# Altium footprint library zbook-rf-shields-BLE-P1.PcbLib: 34 footprints (part 2 of 3)
Each footprint in its own frame and in the unit in brackets; x right, y up, seen from the top. Pads: shape width x height; smd on the part's side, far side on the other; paste and mask are expansions set on the pad; w line width, h text height; cw(c..) or ccw(c..) is an arc to the next point about the centre after c.
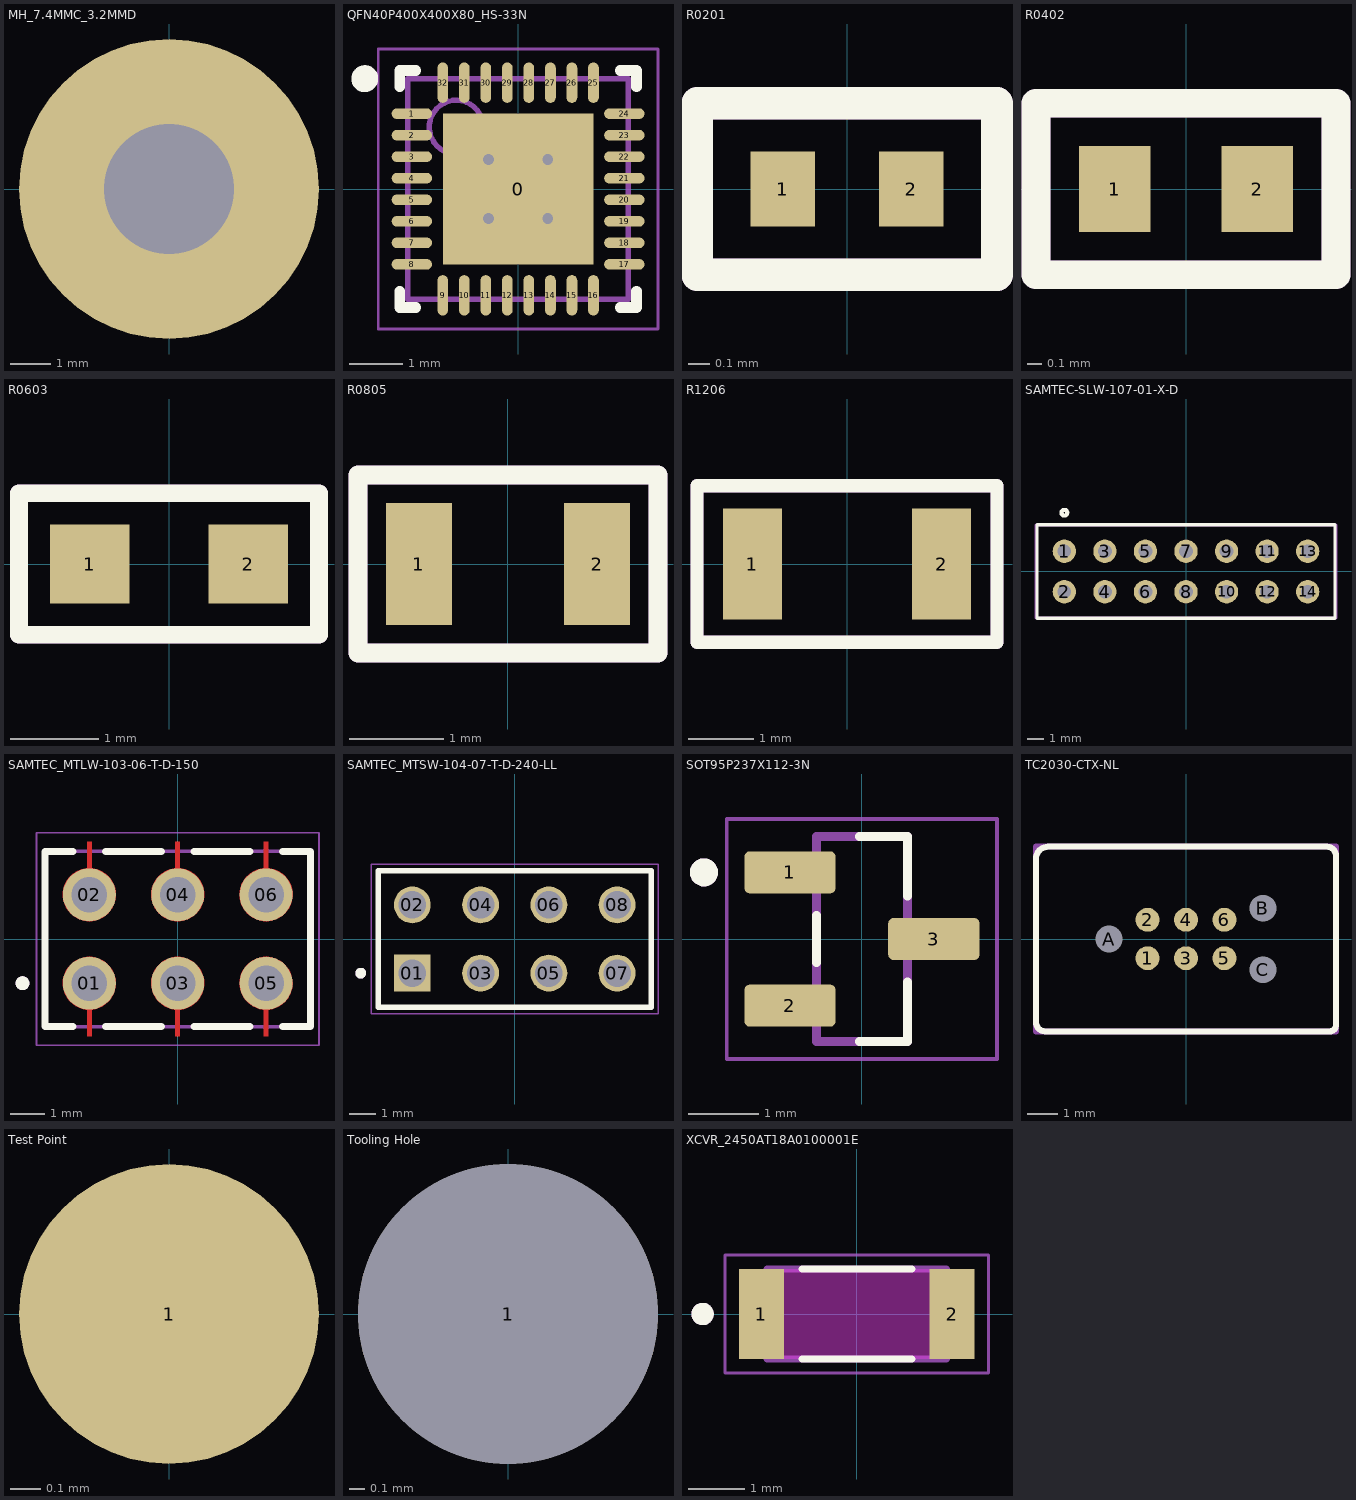
[diagram p1: the footprints below, top view; thin cyan lines are the x and y axes]

## MH_7.4MMC_3.2MMD [mm]
pads (1):
  round 7.4 hole 3.2: ""(0,0)

## PCBComponent_1 [mm]

## QFN40P400X400X80_HS-33N [mm] "QFN, 32-Leads, Body 4,00x4,00mm, Pitch 0,40mm, Thermal Pad 2,80x2,80mm, IPC Medium Density"
height 0.8
pads (33):
  rect 2.8x2.8 smd: 0(0,0)
  oval 0.75x0.2 smd: 1(-1.975,1.4) 2(-1.975,1) 3(-1.975,0.6) 4(-1.975,0.2) 5(-1.975,-0.2) 6(-1.975,-0.6) 7(-1.975,-1) 8(-1.975,-1.4) 17(1.975,-1.4) 18(1.975,-1) 19(1.975,-0.6) 20(1.975,-0.2) 21(1.975,0.2) 22(1.975,0.6) 23(1.975,1) 24(1.975,1.4)
  oval 0.2x0.75 smd: 9(-1.4,-1.975) 10(-1,-1.975) 11(-0.6,-1.975) 12(-0.2,-1.975) 13(0.2,-1.975) 14(0.6,-1.975) 15(1,-1.975) 16(1.4,-1.975) 25(1.4,1.975) 26(1,1.975) 27(0.6,1.975) 28(0.2,1.975) 29(-0.2,1.975) 30(-0.6,1.975) 31(-1,1.975) 32(-1.4,1.975)
via 0.55,-0.55 diameter 0.5 hole 0.2
via -0.55,-0.55 diameter 0.5 hole 0.2
via 0.55,0.55 diameter 0.5 hole 0.2
via -0.55,0.55 diameter 0.5 hole 0.2
Top Overlay:
  circle w0.25: c-2.85,2.05 r0.125
  lines w0.2: -2.2,-1.9 -2.2,-2.2 -1.9,-2.2 ; -2.2,1.9 -2.2,2.2 -1.9,2.2 ; 1.9,-2.2 2.2,-2.2 2.2,-1.9 ; 1.9,2.2 2.2,2.2 2.2,1.9
Top Courtyard:
  lines w0.05: -2.6,-2.6 2.6,-2.6 2.6,2.6 -2.6,2.6 -2.6,-2.6
  lines w0.1: -0.5,0 0.5,0 ; 0,-0.5 0,0.5
Top Assembly:
  circle w0.1: c-1.15,1.15 r0.5
  lines w0.1: -2.05,-2.05 2.05,-2.05 2.05,2.05 -2.05,2.05 -2.05,-2.05
3D body: height 0.25, standoff 0, extent -2.54,-2.54 2.54,2.54

## R0201 [mm]
pads (2):
  rect 0.3x0.35 smd mask+0.06: 1(-0.3,0) 2(0.3,0)
Top Overlay:
  lines w0.15: -0.7,-0.4 0.7,-0.4 0.7,0.4 -0.7,0.4 -0.7,-0.4
Mechanical 29:
  lines w0.15: -0.7,-0.4 -0.7,0.4 0.7,0.4 0.7,-0.4 -0.7,-0.4
  text "'.Designator'" at -0.4,-0.1 h0.2
3D body "C0201.step": height 0.3, standoff 0, extent -0.3,-0.15 0.3,0.15

## R0402 [mm]
pads (2):
  rect 0.5x0.6 smd: 1(-0.5,0) 2(0.5,0)
Top Overlay:
  lines w0.2: -1.05,-0.6 1.05,-0.6 1.05,0.6 -1.05,0.6 -1.05,-0.6
Mechanical 29:
  lines w0.2: -1.05,-0.6 1.05,-0.6 1.05,0.6 -1.05,0.6 -1.05,-0.6
  text "'.Designator'" at -0.75,-0.223 h0.5
3D body "R0402.step": height 0.41, standoff 0.01, extent -0.5,-0.25 0.5,0.25

## R0603 [mm]
height 0.9
pads (2):
  rect 0.9x0.9 smd: 1(-0.9,0) 2(0.9,0)
Top Overlay:
  lines w0.2: -1.7,-0.8 1.7,-0.8 1.7,0.8 -1.7,0.8 -1.7,-0.8
Mechanical 29:
  lines w0.2: -1.7,-0.8 -1.7,0.8 1.7,0.8 1.7,-0.8 -1.7,-0.8
  text "'.Designator'" at -1.3,-0.4 h0.8
3D body "R0603.stp": height 0.46, standoff 0.01, extent -0.775,-0.4 0.775,0.4

## R0805 [mm]
pads (2):
  rect 0.7x1.3 smd: 1(-0.95,0) 2(0.95,0)
Top Overlay:
  lines w0.2: -1.6,-0.95 -1.6,0.95 1.6,0.95 1.6,-0.95 -1.6,-0.95
Mechanical 29:
  lines w0.2: -1.6,-0.95 -1.6,0.95 1.6,0.95 1.6,-0.95 -1.6,-0.95
  text "'.Designator'" at -0.6,-0.347 h0.85
3D body "R0805.step": height 0.61, standoff 0.01, extent -1,-0.6 1,0.6

## R1206 [mm]
pads (2):
  rect 0.9x1.7 smd: 1(-1.45,0) 2(1.45,0)
Top Overlay:
  lines w0.2: -2.3,-1.2 2.3,-1.2 2.3,1.2 -2.3,1.2 -2.3,-1.2
Mechanical 29:
  lines w0.2: -2.3,-1.2 -2.3,1.2 2.3,1.2 2.3,-1.2 -2.3,-1.2
  text "'.Designator'" at -1.5,-0.5 h1
3D body "R1206.stp": height 0.56, standoff 0.01, extent -1.6,-0.8 1.6,0.8

## SAMTEC-SLW-107-01-X-D [mm]
pads (14):
  round 1.46 hole 0.86 mask+0: 1(-7.62,1.27) 2(-7.62,-1.27) 3(-5.08,1.27) 4(-5.08,-1.27) 5(-2.54,1.27) 6(-2.54,-1.27) 7(0,1.27) 8(0,-1.27) 9(2.54,1.27) 10(2.54,-1.27) 11(5.08,1.27) 12(5.08,-1.27) 13(7.62,1.27) 14(7.62,-1.27)
Top Overlay:
  circle w0.254: c-7.62,3.683 r0.18
  lines w0.2: -9.34,-2.927 -9.34,2.927 9.34,2.927 9.34,-2.927 -9.34,-2.927
Top Solder:
  circle w0: c-7.62,1.27 r0.781
  circle w0: c-7.62,-1.27 r0.781
  circle w0: c-5.08,1.27 r0.781
  circle w0: c-5.08,-1.27 r0.781
  circle w0: c-2.54,1.27 r0.781
  circle w0: c-2.54,-1.27 r0.781
  circle w0: c0,1.27 r0.781
  circle w0: c0,-1.27 r0.781
  circle w0: c2.54,1.27 r0.781
  circle w0: c2.54,-1.27 r0.781
  circle w0: c5.08,1.27 r0.781
  circle w0: c5.08,-1.27 r0.781
  circle w0: c7.62,1.27 r0.781
  circle w0: c7.62,-1.27 r0.781
Bottom Solder:
  circle w0: c-7.62,1.27 r0.781
  circle w0: c-7.62,-1.27 r0.781
  circle w0: c-5.08,1.27 r0.781
  circle w0: c-5.08,-1.27 r0.781
  circle w0: c-2.54,1.27 r0.781
  circle w0: c-2.54,-1.27 r0.781
  circle w0: c0,1.27 r0.781
  circle w0: c0,-1.27 r0.781
  circle w0: c2.54,1.27 r0.781
  circle w0: c2.54,-1.27 r0.781
  circle w0: c5.08,1.27 r0.781
  circle w0: c5.08,-1.27 r0.781
  circle w0: c7.62,1.27 r0.781
  circle w0: c7.62,-1.27 r0.781
Mechanical 29:
  lines w0.18: -9.398,-2.921 9.398,-2.921 9.398,2.921 -9.398,2.921 -9.398,-2.921
3D body "SLW-107-01-F-D.stp": height 4.57, standoff -2.92, extent -8.89,-2.476 8.89,2.476

## SAMTEC_MTLW-103-06-T-D-150 [mm]
pads (6):
  round 1.52 hole 1.02: 01(-2.54,-1.27) 02(-2.54,1.27) 03(0,-1.27) 04(0,1.27) 05(2.54,-1.27) 06(2.54,1.27)
Top Layer:
  region: 2.605,2.03 2.634,2.027 2.668,2.022 2.703,2.016 2.737,2.008 2.77,1.998 2.803,1.987 2.836,1.975 2.868,1.961 2.899,1.945 2.93,1.928 2.96,1.91 2.989,1.89 3.016,1.869 3.043,1.847 3.069,1.823 3.094,1.799 3.118,1.773 3.14,1.746 3.161,1.718 3.181,1.69 3.2,1.66 3.217,1.63 3.233,1.598 3.247,1.566 3.26,1.534 3.271,1.501 3.281,1.467 3.289,1.433 3.296,1.399 3.3,1.37 3.3,1.27 3.299,1.23 3.296,1.191 3.291,1.151 3.283,1.112 3.274,1.073 3.263,1.035 3.25,0.998 3.234,0.961 3.217,0.925 3.198,0.89 3.177,0.856 3.155,0.823 3.131,0.792 3.105,0.761 3.077,0.733 3.049,0.705 3.018,0.679 2.987,0.655 2.954,0.633 2.92,0.612 2.885,0.593 2.849,0.576 2.812,0.56 2.775,0.547 2.737,0.536 2.698,0.527 2.659,0.519 2.619,0.514 2.58,0.511 2.54,0.51 2.5,0.511 2.461,0.514 2.421,0.519 2.382,0.527 2.343,0.536 2.305,0.547 2.268,0.56 2.231,0.576 2.195,0.593 2.16,0.612 2.126,0.633 2.093,0.655 2.062,0.679 2.031,0.705 2.003,0.733 1.975,0.761 1.949,0.792 1.925,0.823 1.903,0.856 1.882,0.89 1.863,0.925 1.846,0.961 1.83,0.998 1.817,1.035 1.806,1.073 1.797,1.112 1.789,1.151 1.784,1.191 1.781,1.23 1.78,1.27 1.78,1.37 1.784,1.399 1.791,1.433 1.799,1.467 1.809,1.501 1.82,1.534 1.833,1.566 1.847,1.598 1.863,1.63 1.88,1.66 1.899,1.69 1.919,1.718 1.94,1.746 1.962,1.773 1.986,1.799 2.011,1.823 2.037,1.847 2.064,1.869 2.091,1.89 2.12,1.91 2.15,1.928 2.181,1.945 2.212,1.961 2.244,1.975 2.277,1.987 2.31,1.998 2.343,2.008 2.377,2.016 2.412,2.022 2.446,2.027 2.475,2.03 2.475,2.8 2.605,2.8
  region: 2.619,-0.514 2.698,-0.527 2.775,-0.547 2.849,-0.576 2.92,-0.612 2.987,-0.655 3.049,-0.705 3.105,-0.761 3.155,-0.823 3.198,-0.89 3.234,-0.961 3.263,-1.035 3.283,-1.112 3.296,-1.191 3.3,-1.27 3.299,-1.308 3.296,-1.346 3.292,-1.383 3.285,-1.421 3.277,-1.457 3.267,-1.494 3.255,-1.529 3.241,-1.564 3.226,-1.599 3.209,-1.633 3.19,-1.665 3.17,-1.697 3.148,-1.728 3.125,-1.757 3.1,-1.786 3.074,-1.813 3.046,-1.839 3.017,-1.863 2.988,-1.886 2.957,-1.908 2.925,-1.928 2.892,-1.946 2.858,-1.962 2.823,-1.977 2.788,-1.991 2.752,-2.002 2.716,-2.012 2.679,-2.02 2.642,-2.026 2.605,-2.03 2.605,-2.8 2.475,-2.8 2.475,-2.03 2.438,-2.026 2.401,-2.02 2.364,-2.012 2.328,-2.002 2.292,-1.991 2.257,-1.977 2.222,-1.962 2.188,-1.946 2.155,-1.928 2.123,-1.908 2.092,-1.886 2.063,-1.863 2.034,-1.839 2.006,-1.813 1.98,-1.786 1.955,-1.757 1.932,-1.728 1.91,-1.697 1.89,-1.665 1.871,-1.633 1.854,-1.599 1.839,-1.564 1.825,-1.529 1.813,-1.494 1.803,-1.457 1.795,-1.421 1.788,-1.383 1.784,-1.346 1.781,-1.308 1.78,-1.27 1.784,-1.191 1.797,-1.112 1.817,-1.035 1.846,-0.961 1.882,-0.89 1.925,-0.823 1.975,-0.761 2.031,-0.705 2.093,-0.655 2.16,-0.612 2.231,-0.576 2.305,-0.547 2.382,-0.527 2.461,-0.514 2.54,-0.51
  region: 0.065,2.03 0.094,2.027 0.128,2.022 0.163,2.016 0.197,2.008 0.23,1.998 0.263,1.987 0.296,1.975 0.328,1.961 0.359,1.945 0.39,1.928 0.42,1.91 0.449,1.89 0.476,1.869 0.503,1.847 0.529,1.823 0.554,1.799 0.578,1.773 0.6,1.746 0.621,1.718 0.641,1.69 0.66,1.66 0.677,1.63 0.693,1.598 0.707,1.566 0.72,1.534 0.731,1.501 0.741,1.467 0.749,1.433 0.756,1.399 0.76,1.37 0.76,1.27 0.759,1.23 0.756,1.191 0.751,1.151 0.743,1.112 0.734,1.073 0.723,1.035 0.71,0.998 0.694,0.961 0.677,0.925 0.658,0.89 0.637,0.856 0.615,0.823 0.591,0.792 0.565,0.761 0.537,0.733 0.509,0.705 0.478,0.679 0.447,0.655 0.414,0.633 0.38,0.612 0.345,0.593 0.309,0.576 0.272,0.56 0.235,0.547 0.197,0.536 0.158,0.527 0.119,0.519 0.079,0.514 0.04,0.511 0,0.51 -0.04,0.511 -0.079,0.514 -0.119,0.519 -0.158,0.527 -0.197,0.536 -0.235,0.547 -0.272,0.56 -0.309,0.576 -0.345,0.593 -0.38,0.612 -0.414,0.633 -0.447,0.655 -0.478,0.679 -0.509,0.705 -0.537,0.733 -0.565,0.761 -0.591,0.792 -0.615,0.823 -0.637,0.856 -0.658,0.89 -0.677,0.925 -0.694,0.961 -0.71,0.998 -0.723,1.035 -0.734,1.073 -0.743,1.112 -0.751,1.151 -0.756,1.191 -0.759,1.23 -0.76,1.27 -0.76,1.37 -0.756,1.399 -0.749,1.433 -0.741,1.467 -0.731,1.501 -0.72,1.534 -0.707,1.566 -0.693,1.598 -0.677,1.63 -0.66,1.66 -0.641,1.69 -0.621,1.718 -0.6,1.746 -0.578,1.773 -0.554,1.799 -0.529,1.823 -0.503,1.847 -0.476,1.869 -0.449,1.89 -0.42,1.91 -0.39,1.928 -0.359,1.945 -0.328,1.961 -0.296,1.975 -0.263,1.987 -0.23,1.998 -0.197,2.008 -0.163,2.016 -0.128,2.022 -0.094,2.027 -0.065,2.03 -0.065,2.8 0.065,2.8
  region: 0.079,-0.514 0.158,-0.527 0.235,-0.547 0.309,-0.576 0.38,-0.612 0.447,-0.655 0.509,-0.705 0.565,-0.761 0.615,-0.823 0.658,-0.89 0.694,-0.961 0.723,-1.035 0.743,-1.112 0.756,-1.191 0.76,-1.27 0.759,-1.308 0.756,-1.346 0.752,-1.383 0.745,-1.421 0.737,-1.457 0.727,-1.494 0.715,-1.529 0.701,-1.564 0.686,-1.599 0.669,-1.633 0.65,-1.665 0.63,-1.697 0.608,-1.728 0.585,-1.757 0.56,-1.786 0.534,-1.813 0.506,-1.839 0.477,-1.863 0.448,-1.886 0.417,-1.908 0.385,-1.928 0.352,-1.946 0.318,-1.962 0.283,-1.977 0.248,-1.991 0.212,-2.002 0.176,-2.012 0.139,-2.02 0.102,-2.026 0.065,-2.03 0.065,-2.8 -0.065,-2.8 -0.065,-2.03 -0.102,-2.026 -0.139,-2.02 -0.176,-2.012 -0.212,-2.002 -0.248,-1.991 -0.283,-1.977 -0.318,-1.962 -0.352,-1.946 -0.385,-1.928 -0.417,-1.908 -0.448,-1.886 -0.477,-1.863 -0.506,-1.839 -0.534,-1.813 -0.56,-1.786 -0.585,-1.757 -0.608,-1.728 -0.63,-1.697 -0.65,-1.665 -0.669,-1.633 -0.686,-1.599 -0.701,-1.564 -0.715,-1.529 -0.727,-1.494 -0.737,-1.457 -0.745,-1.421 -0.752,-1.383 -0.756,-1.346 -0.759,-1.308 -0.76,-1.27 -0.756,-1.191 -0.743,-1.112 -0.723,-1.035 -0.694,-0.961 -0.658,-0.89 -0.615,-0.823 -0.565,-0.761 -0.509,-0.705 -0.447,-0.655 -0.38,-0.612 -0.309,-0.576 -0.235,-0.547 -0.158,-0.527 -0.079,-0.514 0,-0.51
  region: -2.475,2.03 -2.446,2.027 -2.412,2.022 -2.377,2.016 -2.343,2.008 -2.31,1.998 -2.277,1.987 -2.244,1.975 -2.212,1.961 -2.181,1.945 -2.15,1.928 -2.12,1.91 -2.091,1.89 -2.064,1.869 -2.037,1.847 -2.011,1.823 -1.986,1.799 -1.962,1.773 -1.94,1.746 -1.919,1.718 -1.899,1.69 -1.88,1.66 -1.863,1.63 -1.847,1.598 -1.833,1.566 -1.82,1.534 -1.809,1.501 -1.799,1.467 -1.791,1.433 -1.784,1.399 -1.78,1.37 -1.78,1.27 -1.781,1.23 -1.784,1.191 -1.789,1.151 -1.797,1.112 -1.806,1.073 -1.817,1.035 -1.83,0.998 -1.846,0.961 -1.863,0.925 -1.882,0.89 -1.903,0.856 -1.925,0.823 -1.949,0.792 -1.975,0.761 -2.003,0.733 -2.031,0.705 -2.062,0.679 -2.093,0.655 -2.126,0.633 -2.16,0.612 -2.195,0.593 -2.231,0.576 -2.268,0.56 -2.305,0.547 -2.343,0.536 -2.382,0.527 -2.421,0.519 -2.461,0.514 -2.5,0.511 -2.54,0.51 -2.58,0.511 -2.619,0.514 -2.659,0.519 -2.698,0.527 -2.737,0.536 -2.775,0.547 -2.812,0.56 -2.849,0.576 -2.885,0.593 -2.92,0.612 -2.954,0.633 -2.987,0.655 -3.018,0.679 -3.049,0.705 -3.077,0.733 -3.105,0.761 -3.131,0.792 -3.155,0.823 -3.177,0.856 -3.198,0.89 -3.217,0.925 -3.234,0.961 -3.25,0.998 -3.263,1.035 -3.274,1.073 -3.283,1.112 -3.291,1.151 -3.296,1.191 -3.299,1.23 -3.3,1.27 -3.3,1.37 -3.296,1.399 -3.289,1.433 -3.281,1.467 -3.271,1.501 -3.26,1.534 -3.247,1.566 -3.233,1.598 -3.217,1.63 -3.2,1.66 -3.181,1.69 -3.161,1.718 -3.14,1.746 -3.118,1.773 -3.094,1.799 -3.069,1.823 -3.043,1.847 -3.016,1.869 -2.989,1.89 -2.96,1.91 -2.93,1.928 -2.899,1.945 -2.868,1.961 -2.836,1.975 -2.803,1.987 -2.77,1.998 -2.737,2.008 -2.703,2.016 -2.668,2.022 -2.634,2.027 -2.605,2.03 -2.605,2.8 -2.475,2.8
  region: -2.461,-0.514 -2.382,-0.527 -2.305,-0.547 -2.231,-0.576 -2.16,-0.612 -2.093,-0.655 -2.031,-0.705 -1.975,-0.761 -1.925,-0.823 -1.882,-0.89 -1.846,-0.961 -1.817,-1.035 -1.797,-1.112 -1.784,-1.191 -1.78,-1.27 -1.781,-1.308 -1.784,-1.346 -1.788,-1.383 -1.795,-1.421 -1.803,-1.457 -1.813,-1.494 -1.825,-1.529 -1.839,-1.564 -1.854,-1.599 -1.871,-1.633 -1.89,-1.665 -1.91,-1.697 -1.932,-1.728 -1.955,-1.757 -1.98,-1.786 -2.006,-1.813 -2.034,-1.839 -2.063,-1.863 -2.092,-1.886 -2.123,-1.908 -2.155,-1.928 -2.188,-1.946 -2.222,-1.962 -2.257,-1.977 -2.292,-1.991 -2.328,-2.002 -2.364,-2.012 -2.401,-2.02 -2.438,-2.026 -2.475,-2.03 -2.475,-2.8 -2.605,-2.8 -2.605,-2.03 -2.642,-2.026 -2.679,-2.02 -2.716,-2.012 -2.752,-2.002 -2.788,-1.991 -2.823,-1.977 -2.858,-1.962 -2.892,-1.946 -2.925,-1.928 -2.957,-1.908 -2.988,-1.886 -3.017,-1.863 -3.046,-1.839 -3.074,-1.813 -3.1,-1.786 -3.125,-1.757 -3.148,-1.728 -3.17,-1.697 -3.19,-1.665 -3.209,-1.633 -3.226,-1.599 -3.241,-1.564 -3.255,-1.529 -3.267,-1.494 -3.277,-1.457 -3.285,-1.421 -3.292,-1.383 -3.296,-1.346 -3.299,-1.308 -3.3,-1.27 -3.296,-1.191 -3.283,-1.112 -3.263,-1.035 -3.234,-0.961 -3.198,-0.89 -3.155,-0.823 -3.105,-0.761 -3.049,-0.705 -2.987,-0.655 -2.92,-0.612 -2.849,-0.576 -2.775,-0.547 -2.698,-0.527 -2.619,-0.514 -2.54,-0.51
Top Overlay:
  circle w0.2: c-4.46,-1.27 r0.1
  lines w0.2: -3.005,-2.515 -3.81,-2.515 -3.81,2.515 -3.005,2.515 ; -2.075,-2.515 -0.465,-2.515 ; -2.075,2.515 -0.465,2.515 ; 0.465,-2.515 2.075,-2.515 ; 0.465,2.515 2.075,2.515 ; 3.005,-2.515 3.81,-2.515 3.81,2.515 3.005,2.515
Top Paste:
  region: 2.795,2.04 3.16,1.725 3.62,1.725 3.62,0.185 1.46,0.185 1.46,1.725 1.92,1.725 2.285,2.04 2.285,2.8 2.795,2.8
  region: 3.62,-1.725 3.16,-1.725 2.795,-2.04 2.795,-2.8 2.285,-2.8 2.285,-2.04 1.92,-1.725 1.46,-1.725 1.46,-0.185 3.62,-0.185
  region: 0.255,2.04 0.62,1.725 1.08,1.725 1.08,0.185 -1.08,0.185 -1.08,1.725 -0.62,1.725 -0.255,2.04 -0.255,2.8 0.255,2.8
  region: 1.08,-1.725 0.62,-1.725 0.255,-2.04 0.255,-2.8 -0.255,-2.8 -0.255,-2.04 -0.62,-1.725 -1.08,-1.725 -1.08,-0.185 1.08,-0.185
  region: -2.285,2.04 -1.92,1.725 -1.46,1.725 -1.46,0.185 -3.62,0.185 -3.62,1.725 -3.16,1.725 -2.795,2.04 -2.795,2.8 -2.285,2.8
  region: -1.46,-1.725 -1.92,-1.725 -2.285,-2.04 -2.285,-2.8 -2.795,-2.8 -2.795,-2.04 -3.16,-1.725 -3.62,-1.725 -3.62,-0.185 -1.46,-0.185
Top Solder:
  drawing of 6 lines, arcs and shapes, not listed
Mechanical 13:
  circle w0.2: c-4.46,-1.27 r0.1
  lines w0.1: -3.81,-2.515 3.81,-2.515 3.81,2.515 -3.81,2.515 -3.81,-2.515
Mechanical 15:
  lines w0.05: -4.06,-3.05 4.06,-3.05 4.06,3.05 -4.06,3.05 -4.06,-3.05

## SAMTEC_MTSW-104-07-T-D-240-LL [mm]
pads (8):
  rect 1.37x1.37 / inner round 1.37 / far side rect 1.37x1.37 hole 1.02: 01(-3.81,-1.27)
  round 1.37 hole 1.02: 02(-3.81,1.27) 03(-1.27,-1.27) 04(-1.27,1.27) 05(1.27,-1.27) 06(1.27,1.27) 07(3.81,-1.27) 08(3.81,1.27)
Top Overlay:
  circle w0.2: c-5.73,-1.27 r0.1
  lines w0.2: -5.08,-2.54 5.08,-2.54 5.08,2.54 -5.08,2.54 -5.08,-2.54
Mechanical 13:
  circle w0.2: c-5.73,-1.27 r0.1
  lines w0.1: -5.08,-2.54 -5.08,2.54 ; -5.08,-2.54 5.08,-2.54 ; -5.08,-2.54 -5.08,2.54 ; -5.08,2.54 5.08,2.54 ; -5.08,2.54 5.08,2.54 ; 5.08,-2.54 5.08,2.54 ; 5.08,-2.54 5.08,2.54
Mechanical 15:
  lines w0.05: -5.33,-2.79 5.33,-2.79 5.33,2.79 -5.33,2.79 -5.33,-2.79

## SOT95P237X112-3N [mm]
height 1.12
pads (3):
  rrect25% 1.3x0.6 smd paste+0 mask+0.102: 1(-1.025,0.95) 2(-1.025,-0.95) 3(1.025,0)
Top Overlay:
  circle w0.2: c-2.25,0.95 r0.1
  lines w0.127: -0.65,-0.335 -0.65,0.335 ; -0.035,-1.46 0.65,-1.46 0.65,-0.615 ; -0.035,1.46 0.65,1.46 0.65,0.615
Mechanical 13:
  circle w0.2: c-2.25,0.95 r0.1
  lines w0.127: -0.65,-1.46 0.65,-1.46 0.65,1.46 -0.65,1.46 -0.65,-1.46
Mechanical 15:
  lines w0.05: -1.925,-1.71 1.925,-1.71 1.925,1.71 -1.925,1.71 -1.925,-1.71
3D body "step_temp.STEP": height 1.12, standoff 0, extent -1.185,-1.46 1.185,1.46

## TC2030-CTX-NL [mil]
pads (9):
  round 31 smd paste-19.68: 1(-50,-25) 2(-50,25) 3(0,-25) 4(0,25) 5(50,-25) 6(50,25)
  round 34 hole 35 unplated: A(-100,0) B(100,40) C(100,-40)
Top Overlay:
  lines w7.87: -195,-108.15 ccw(c-183.15,-108.15) -183.15,-120 187.09,-120 ccw(c187.09,-112.09) 195,-112.09 195,108.15 ccw(c183.15,108.15) 183.15,120 -179.21,120 ccw(c-179.21,104.21) -195,104.21 -195,-108.15
Mechanical 29:
  lines w7.87: -194.88,-120.08 195,-120.08 195,120.08 -194.88,120.08 -194.88,-120.08
  text "'.Designator'" at -82.68,-23.62 h33.46

## Test Point [mm]
pads (1):
  round 1 smd paste-1: 1(0,0)

## Tooling Hole [mm]
pads (1):
  round 2 hole 2 unplated: 1(0,0)

## XCVR_2450AT18A0100001E [mm]
height 1.4
pads (2):
  rect 0.8x1.6 smd: 1(-1.7,0) 2(1.7,0)
Top Overlay:
  circle w0.2: c-2.75,0 r0.1
  lines w0.127: -0.98,-0.8 0.98,-0.8 ; -0.98,0.8 0.98,0.8
Keep-Out Layer:
  region: 1.3,-0.8 -1.3,-0.8 -1.3,0.8 1.3,0.8
  region: 1.3,-0.8 -1.3,-0.8 -1.3,0.8 1.3,0.8
Mechanical 13:
  circle w0.2: c-2.75,0 r0.1
  lines w0.127: -1.6,-0.8 -1.6,0.8 1.6,0.8 1.6,-0.8 -1.6,-0.8
Mechanical 15:
  lines w0.05: -2.35,-1.05 2.35,-1.05 2.35,1.05 -2.35,1.05 -2.35,-1.05
3D body "step_temp.STEP": height 1.4, standoff 0, extent -1.6,-0.8 1.6,0.8